# Altium footprint library 1868076.PcbLib: 1 footprints
Each footprint in its own frame and in the unit in brackets; x right, y up, seen from the top. Pads: shape width x height; smd on the part's side, far side on the other; paste and mask are expansions set on the pad; w line width, h text height; cw(c..) or ccw(c..) is an arc to the next point about the centre after c.
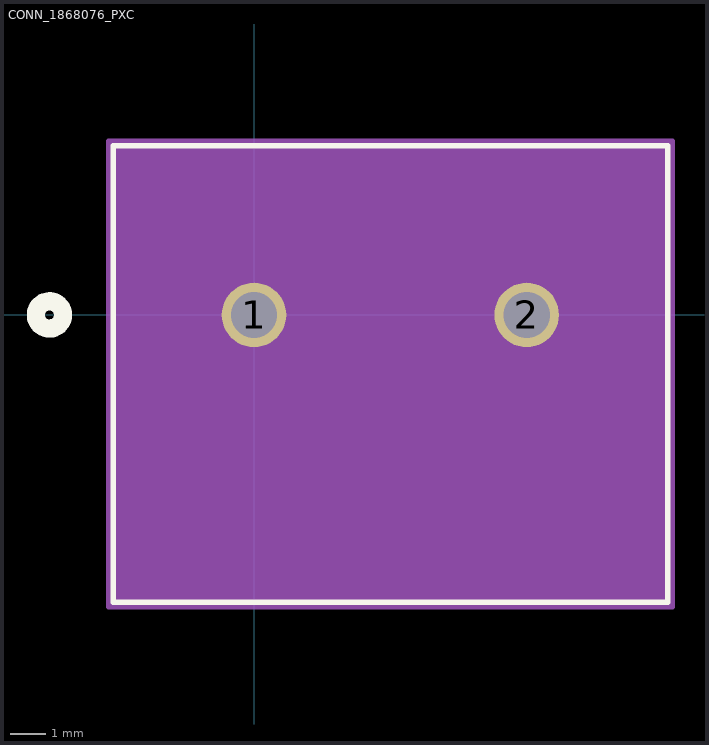
[diagram p0: the footprint, top view; thin cyan lines are the x and y axes]

## CONN_1868076_PXC [mil]
pads (2):
  round 71 / inner round 60 / far side round 71 hole 51 paste-99999 mask+0: 1(0,0) 2(300,0)
Top Overlay:
  circle w20: c-225,0 r15
  lines w6: -155,-316.02 -155,186.1 455,186.1 455,-316.02 -155,-316.02
Bottom Overlay:
  circle w20: c-225,0 r15
Mechanical 13:
  circle w20: c0,75 r15
  lines w1: -150,-311.02 -150,181.1 450,181.1 450,-311.02 -150,-311.02
Mechanical 15:
  region: 460,191.1 -160,191.1 -160,-321.02 460,-321.02
  lines w6: -160,-321.02 460,-321.02 460,191.1 -160,191.1 -160,-321.02